# Altium footprint library XGL5050.PcbLib: 1 footprints
Each footprint in its own frame and in the unit in brackets; x right, y up, seen from the top. Pads: shape width x height; smd on the part's side, far side on the other; paste and mask are expansions set on the pad; w line width, h text height; cw(c..) or ccw(c..) is an arc to the next point about the centre after c.
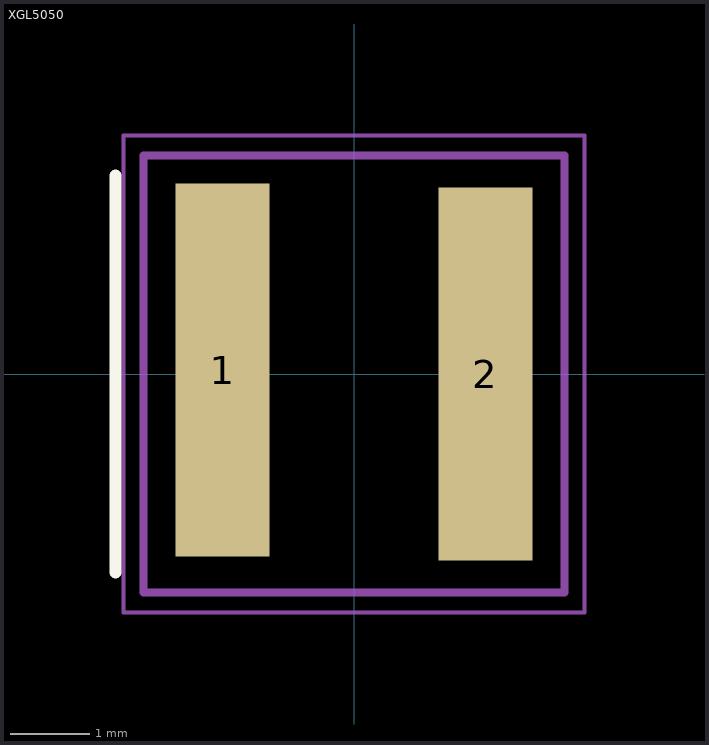
[diagram p0: the footprint, top view; thin cyan lines are the x and y axes]

## XGL5050 [mm]
height 5.1
pads (2):
  rect 1.18x4.7 smd mask+0: 1(-1.655,0.05) 2(1.655,0)
Top Overlay:
  lines w0.15: -3,-2.5 -3,2.5
Top Courtyard:
  lines w0.05: -2.9,-3 2.9,-3 2.9,3 -2.9,3 -2.9,-3
Top Component Outline:
  lines w0.1: -2.65,-2.75 2.65,-2.75 2.65,2.75 -2.65,2.75 -2.65,-2.75
3D body "XGL5050.STEP": height 5.1, standoff 0, extent -2.74,-2.84 2.74,2.84